# Altium footprint library PEC11R-4220F-S0012.PcbLib: 1 footprints
Each footprint in its own frame and in the unit in brackets; x right, y up, seen from the top. Pads: shape width x height; smd on the part's side, far side on the other; paste and mask are expansions set on the pad; w line width, h text height; cw(c..) or ccw(c..) is an arc to the next point about the centre after c.
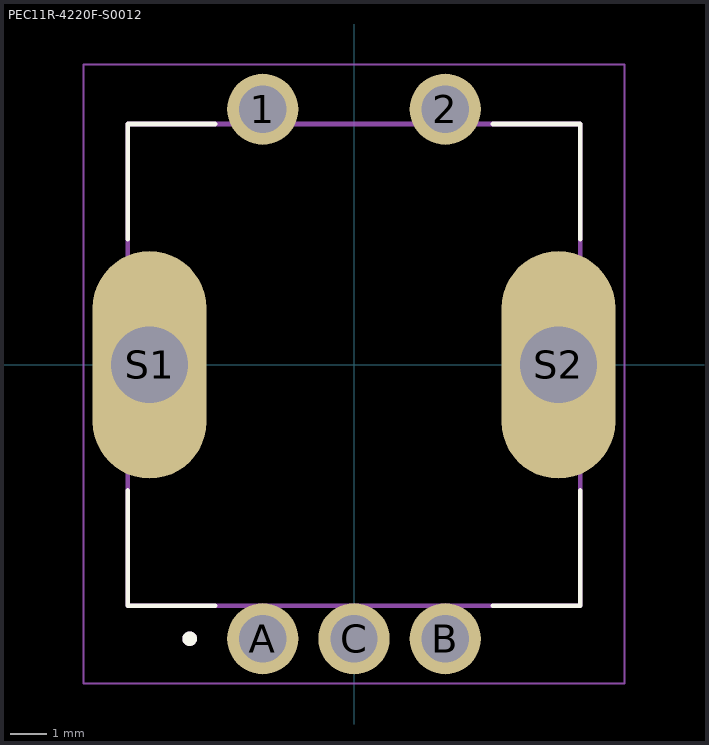
[diagram p0: the footprint, top view; thin cyan lines are the x and y axes]

## PEC11R-4220F-S0012 [mm]
height 24
pads (7):
  round 1.95 hole 1.3 mask+0.102: 1(-2.5,7) 2(2.5,7) A(-2.5,-7.5) B(2.5,-7.5) C(0,-7.5)
  oval 3.116x6.232 hole 2.1 square mask+0.102: S1(-5.6,0) S2(5.6,0)
Top Overlay:
  circle w0.2: c-4.5,-7.5 r0.1
  lines w0.127: -6.2,-3.44 -6.2,-6.6 -3.8,-6.6 ; -6.2,3.44 -6.2,6.6 -3.8,6.6 ; 3.8,-6.6 6.2,-6.6 6.2,-3.44 ; 3.8,6.6 6.2,6.6 6.2,3.44
Assembly Top:
  circle w0.2: c-4.5,-7.5 r0.1
  lines w0.127: -6.2,-6.6 -6.2,6.6 6.2,6.6 6.2,-6.6 -6.2,-6.6
Courtyard Top:
  lines w0.05: -7.41,-8.73 7.41,-8.73 7.41,8.23 -7.41,8.23 -7.41,-8.73
3D body "pec11r-4220f-s0012.stp": height 26.6, standoff -3.6, extent -7,-7.7 7,7.2